# Altium schematic symbol library CDSOT23-SM712.SchLib: 1 symbol
Pins are listed as number, name and electrical type; pins without a type are passive.

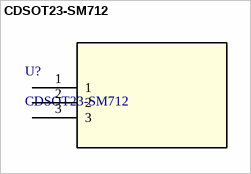
[diagram p0: symbol CDSOT23-SM712]

## CDSOT23-SM712
designator U?
Description; Manufacturer_Name: Bourns Electronics; Copyright: Copyright (C) 2026 Ultra Librarian. All rights reserved.; Manufacturer_Part_Number: CDSOT23-SM712; RefDes: RefDes; Type: Type
footprint SOT_SM712
pins: 1, 2, 3